# Altium footprint library CoilcraftPCB.PcbLib: 320 footprints (part 12 of 20)
Each footprint in its own frame and in the unit in brackets; x right, y up, seen from the top. Pads: shape width x height; smd on the part's side, far side on the other; paste and mask are expansions set on the pad; w line width, h text height; cw(c..) or ccw(c..) is an arc to the next point about the centre after c.
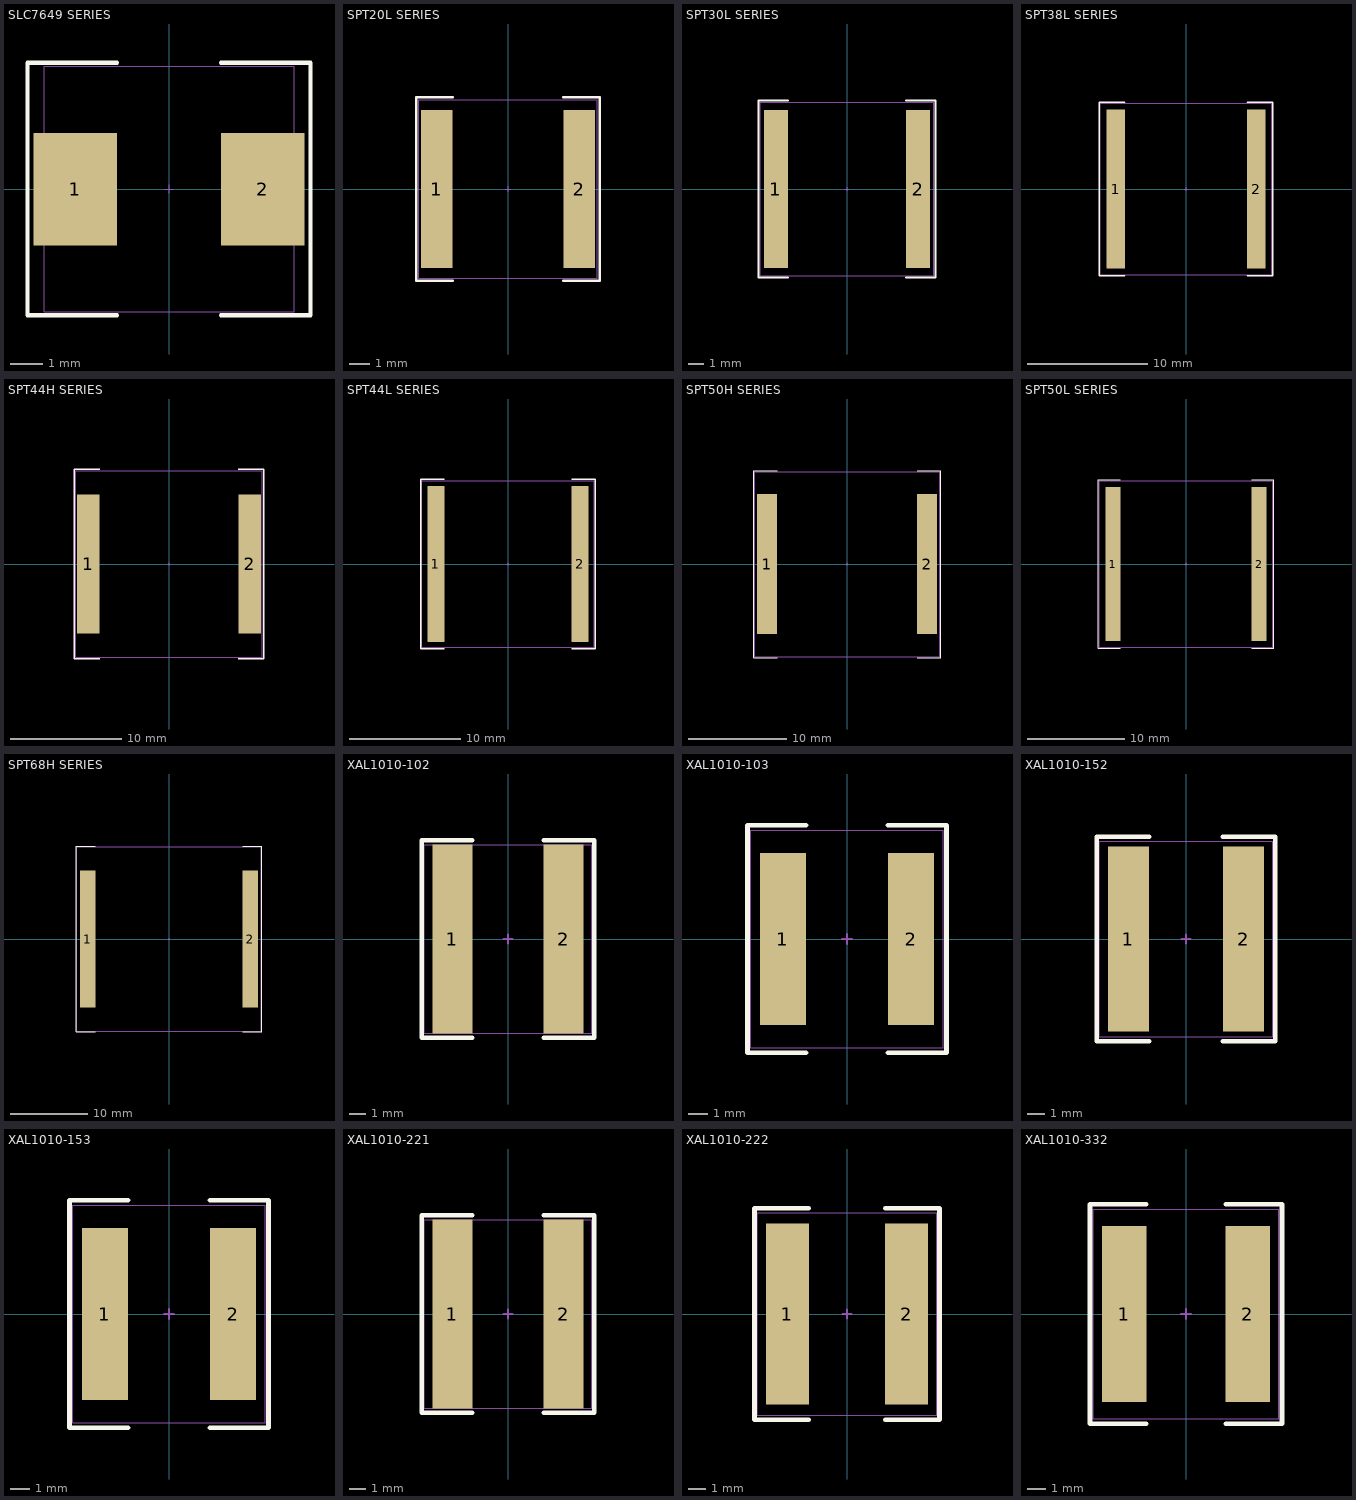
[diagram p11: the footprints below, top view; thin cyan lines are the x and y axes]

## SLC7649 SERIES [mil] "Coilcraft Shielded Power Inductors"
height 195
pads (2):
  rect 100x135 smd: 1(-112.5,0) 2(112.5,0)
Top Overlay:
  lines w5: -62.5,-151.5 -170,-151.5 -170,151.5 -62.5,151.5 ; 62.5,-151.5 170,-151.5 170,151.5 62.5,151.5
Mechanical 13:
  lines w1: -5,0 5,0 ; 0,-5 0,5
Mechanical 14:
  lines w1: -150,-147.5 -150,147.5 150,147.5 150,-147.5 -150,-147.5
3D body: height 196.34, standoff 1.06, extent -150,-147.44 150,147.44

## SPT20L SERIES [mil] "Coilcraft Toroid Power Inductors"
height 280
pads (2):
  rect 60x300 smd: 1(-135,0) 2(135,0)
Top Overlay:
  lines w5: -105,-174 -174,-174 -174,174 -105,174 ; 105,-174 174,-174 174,174 105,174
Mechanical 13:
  lines w1: -5,0 5,0 ; 0,-5 0,5
Mechanical 14:
  lines w1: -170,-170 -170,170 170,170 170,-170 -170,-170
3D body: height 276.34, standoff 0.11, extent -170.08,-170.08 170.08,170.08

## SPT30L SERIES [mil] "Coilcraft Toroid Power Inductors"
height 370
pads (2):
  rect 60x400 smd: 1(-180,0) 2(180,0)
Top Overlay:
  lines w5: -150,-224 -224,-224 -224,224 -150,224 ; 150,-224 224,-224 224,224 150,224
Mechanical 13:
  lines w1: -5,0 5,0 ; 0,-5 0,5
Mechanical 14:
  lines w1: -220,-220 -220,220 220,220 220,-220 -220,-220
3D body: height 375.6, standoff 0.34, extent -220.08,-217.52 220.08,217.52

## SPT38L SERIES [mil] "Coilcraft Toroid Power Inductors"
height 370
pads (2):
  rect 60x520 smd: 1(-230,0) 2(230,0)
Top Overlay:
  lines w5: -200,-284 -284,-284 -284,284 -200,284 ; 200,-284 284,-284 284,284 200,284
Mechanical 13:
  lines w1: -5,0 5,0 ; 0,-5 0,5
Mechanical 14:
  lines w1: -280,-280 280,-280 280,280 -280,280 -280,-280
3D body: height 374.99, standoff 0.84, extent -279.92,-282.48 279.92,282.48

## SPT44H SERIES [mil] "Coilcraft Toroid Power Inductors"
height 410
pads (2):
  rect 80x490 smd: 1(-285,0) 2(285,0)
Top Overlay:
  lines w5: -245,-334 -334,-334 -334,334 -245,334 ; 245,-334 334,-334 334,334 245,334
Mechanical 13:
  lines w1: -5,0 5,0 ; 0,-5 0,5
Mechanical 14:
  lines w1: -330,-330 -330,330 330,330 330,-330 -330,-330
3D body: height 372.84, standoff -0.86, extent -332.48,-332.48 332.48,332.48

## SPT44L SERIES [mil] "Coilcraft Toroid Power Inductors"
height 410
pads (2):
  rect 60x550 smd: 1(-255,0) 2(255,0)
Top Overlay:
  lines w5: -225,-299 -309,-299 -309,299 -225,299 ; 225,-299 309,-299 309,299 225,299
Mechanical 13:
  lines w1: -5,0 5,0 ; 0,-5 0,5
Mechanical 14:
  lines w1: -305,-295 305,-295 305,295 -305,295 -305,-295
3D body: height 413.61, standoff 0.1, extent -300,-287.6 300,287.59

## SPT50H SERIES [mil] "Coilcraft Toroid Power Inductors"
height 410
pads (2):
  rect 80x560 smd: 1(-320,0) 2(320,0)
Top Overlay:
  lines w5: -280,-374 -374,-374 -374,374 -280,374 ; 280,-374 374,-374 374,374 280,374
Mechanical 13:
  lines w1: -5,0 5,0 ; 0,-5 0,5
Mechanical 14:
  lines w1: -370,-370 370,-370 370,370 -370,370 -370,-370
3D body: height 410.98, standoff 0.68, extent -370.08,-370.08 370.08,370.08

## SPT50L SERIES [mil] "Coilcraft Toroid Power Inductors"
height 410
pads (2):
  rect 60x620 smd: 1(-295,0) 2(295,0)
Top Overlay:
  lines w5: -265,-339 -354,-339 -354,339 -265,339 ; 265,-339 354,-339 354,339 265,339
Mechanical 13:
  lines w1: -5,0 5,0 ; 0,-5 0,5
Mechanical 14:
  lines w1: -350,-335 350,-335 350,335 -350,335 -350,-335
3D body: height 405.19, standoff -0.51, extent -350,-335.04 350,335.04

## SPT68H SERIES [mil] "Coilcraft Toroid Power Inductors"
height 410
pads (2):
  rect 80x700 smd: 1(-415,0) 2(415,0)
Top Overlay:
  lines w5: -375,-474 -474,-474 -474,474 -375,474 ; 375,-474 474,-474 474,474 375,474
Mechanical 13:
  lines w1: -5,0 5,0 ; 0,-5 0,5
Mechanical 14:
  lines w1: -470,-470 -470,470 470,470 470,-470 -470,-470
3D body: height 372.97, standoff -0.36, extent -470.08,-470.08 470.08,470.08

## XAL1010-102 [mil] "Coilcraft High Temperature Shielded Power Inductors"
height 394
pads (2):
  rect 94x445 smd: 1(-131,0) 2(131,0)
Top Overlay:
  lines w10: -84,-232.5 -203.5,-232.5 -203.5,232.5 -84,232.5 ; 84,-232.5 203.5,-232.5 203.5,232.5 84,232.5
Mechanical 13:
  lines w5: -10,0 10,0 ; 0,-10 0,10
Mechanical 14:
  lines w1: -197,-222.5 197,-222.5 197,222.5 -197,222.5 -197,-222.5
3D body: height 393.76, standoff 0.06, extent -206.7,-232.29 206.69,232.28

## XAL1010-103 [mil] "Coilcraft High Temperature Shielded Power Inductors"
height 394
pads (2):
  rect 94x351 smd: 1(-131,0) 2(131,0)
Top Overlay:
  lines w10: -84,-232.5 -203.5,-232.5 -203.5,232.5 -84,232.5 ; 84,-232.5 203.5,-232.5 203.5,232.5 84,232.5
Mechanical 13:
  lines w5: -10,0 10,0 ; 0,-10 0,10
Mechanical 14:
  lines w1: -197,-222.5 197,-222.5 197,222.5 -197,222.5 -197,-222.5
3D body: height 393.76, standoff 0.06, extent -206.7,-232.29 206.69,232.28

## XAL1010-152 [mil] "Coilcraft High Temperature Shielded Power Inductors"
height 394
pads (2):
  rect 94x421 smd: 1(-131,0) 2(131,0)
Top Overlay:
  lines w10: -84,-232.5 -203.5,-232.5 -203.5,232.5 -84,232.5 ; 84,-232.5 203.5,-232.5 203.5,232.5 84,232.5
Mechanical 13:
  lines w5: -10,0 10,0 ; 0,-10 0,10
Mechanical 14:
  lines w1: -197,-222.5 197,-222.5 197,222.5 -197,222.5 -197,-222.5
3D body: height 393.76, standoff 0.06, extent -206.7,-232.29 206.69,232.28

## XAL1010-153 [mil] "Coilcraft High Temperature Shielded Power Inductors"
height 394
pads (2):
  rect 94x351 smd: 1(-131,0) 2(131,0)
Top Overlay:
  lines w10: -84,-232.5 -203.5,-232.5 -203.5,232.5 -84,232.5 ; 84,-232.5 203.5,-232.5 203.5,232.5 84,232.5
Mechanical 13:
  lines w5: -10,0 10,0 ; 0,-10 0,10
Mechanical 14:
  lines w1: -197,-222.5 197,-222.5 197,222.5 -197,222.5 -197,-222.5
3D body: height 393.76, standoff 0.06, extent -206.7,-232.29 206.69,232.28

## XAL1010-221 [mil] "Coilcraft High Temperature Shielded Power Inductors"
height 394
pads (2):
  rect 94x445 smd: 1(-131,0) 2(131,0)
Top Overlay:
  lines w10: -84,-232.5 -203.5,-232.5 -203.5,232.5 -84,232.5 ; 84,-232.5 203.5,-232.5 203.5,232.5 84,232.5
Mechanical 13:
  lines w5: -10,0 10,0 ; 0,-10 0,10
Mechanical 14:
  lines w1: -197,-222.5 197,-222.5 197,222.5 -197,222.5 -197,-222.5
3D body: height 393.76, standoff 0.06, extent -206.7,-232.29 206.69,232.28

## XAL1010-222 [mil] "Coilcraft High Temperature Shielded Power Inductors"
height 394
pads (2):
  rect 94x398 smd: 1(-131,0) 2(131,0)
Top Overlay:
  lines w10: -84,-232.5 -203.5,-232.5 -203.5,232.5 -84,232.5 ; 84,-232.5 203.5,-232.5 203.5,232.5 84,232.5
Mechanical 13:
  lines w5: -10,0 10,0 ; 0,-10 0,10
Mechanical 14:
  lines w1: -197,-222.5 -197,222.5 197,222.5 197,-222.5 -197,-222.5
3D body: height 393.76, standoff 0.06, extent -206.7,-232.29 206.69,232.28

## XAL1010-332 [mil] "Coilcraft High Temperature Shielded Power Inductors"
height 394
pads (2):
  rect 94x374 smd: 1(-131,0) 2(131,0)
Top Overlay:
  lines w10: -84,-232.5 -203.5,-232.5 -203.5,232.5 -84,232.5 ; 84,-232.5 203.5,-232.5 203.5,232.5 84,232.5
Mechanical 13:
  lines w5: -10,0 10,0 ; 0,-10 0,10
Mechanical 14:
  lines w1: -197,-222.5 -197,222.5 197,222.5 197,-222.5 -197,-222.5
3D body: height 393.76, standoff 0.06, extent -206.7,-232.29 206.69,232.28